# Altium schematic symbol library Components - 26.10.26 - 20.34.SchLib: 1 symbol
Pins are listed as number, name and electrical type; pins without a type are passive.

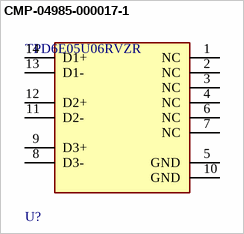
[diagram p0: symbol CMP-04985-000017-1]

## CMP-04985-000017-1
designator U?, comment TPD6E05U06RVZR
TVS DIODE 5.5V 14V 14USON; Number of Channels: 6; Peak Pulse Current: 2.5A; Polarity: Bidirectional; Interface: LVDS; Leakage Current: 10nA; Direction: Unidirectional; Power Line Protection: Yes; Breakdown Voltage: 6V; Max Power Dissipation: 40W; Min Operating Temperature: -40°C; Working Voltage: 5.5V; Number of Pins: 14; Termination: SMD/SMT; Number of Bidirectional Channels: 6; Reverse Standoff Voltage: 5.5V; Package Quantity: 3000; Mount: Surface Mount; Max Operating Temperature: 125°C; Radiation Hardening: No; Length: 3.6mm; RoHS Compliant: Yes; Lead Free: Lead Free; Packaging: Tape and Reel; Min Breakdown Voltage: 6V; Clamping Voltage: 14V; Peak Pulse Power: 40W; Depth: 1.45mm
footprint FP-RVZ0014A-IPC_A
footprint FP-RVZ0014A-MFG
footprint FP-RVZ0014A-IPC_B
footprint FP-RVZ0014A-IPC_C
pins: 1 NC, 2 NC, 3 NC, 4 NC, 5 GND (power), 6 NC, 7 NC, 8 D3-, 9 D3+, 10 GND (power), 11 D2-, 12 D2+, 13 D1-, 14 D1+